# Altium footprint library BaseStation.PcbLib: 68 footprints (part 5 of 5)
Each footprint in its own frame and in the unit in brackets; x right, y up, seen from the top. Pads: shape width x height; smd on the part's side, far side on the other; paste and mask are expansions set on the pad; w line width, h text height; cw(c..) or ccw(c..) is an arc to the next point about the centre after c.
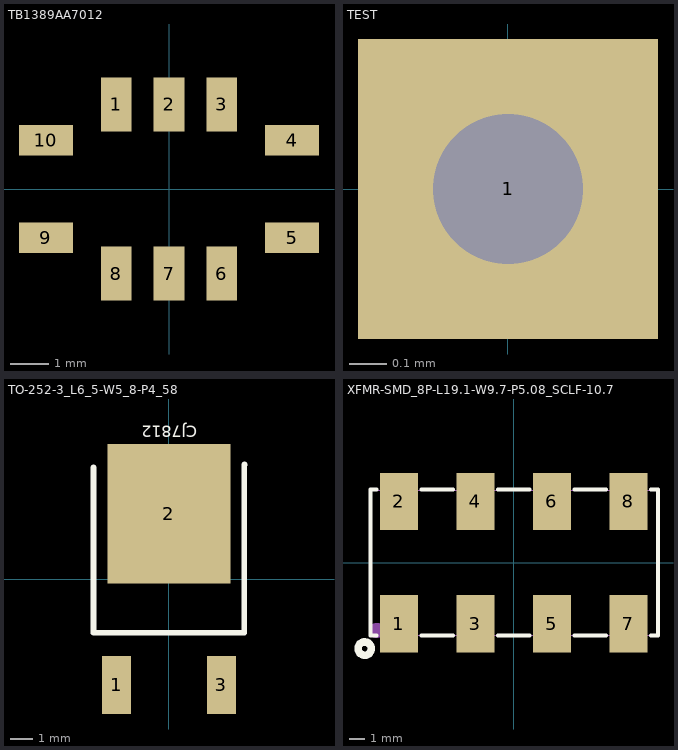
[diagram p4: the footprints below, top view; thin cyan lines are the x and y axes]

## TB1389AA7012 [mm]
pads (10):
  rect 0.8x1.4 smd: 1(-1.37,2.2) 2(0,2.2) 3(1.37,2.2) 6(1.37,-2.2) 7(0,-2.2) 8(-1.37,-2.2)
  rect 1.4x0.8 smd: 4(3.2,1.27) 5(3.2,-1.27) 9(-3.2,-1.27) 10(-3.2,1.27)

## TEST [mm] "TEST"
pads (1):
  rect 0.8x0.8 hole 0.4: 1(0,0)

## TO-252-3_L6_5-W5_8-P4_58 [mm] "TO-252-3_L6_5-W5_8-P4_58"
pads (3):
  rect 1.27x2.54 smd: 1(-2.285,-4.637) 3(2.291,-4.635)
  rect 5.4x6.1 smd: 2(0.001,2.857)
Top Overlay:
  lines w0.254: -3.301,4.759 -3.301,4.886 -3.303,-2.353 3.301,-2.353 3.301,4.886 3.303,5.013
  text "CJ7812" at 1.235,6.72 h0.51

## XFMR-SMD_8P-L19.1-W9.7-P5.08_SCLF-10.7 [mm]
pads (8):
  rect 2.54x3.81 smd: 1(-7.62,-4.065) 2(-7.62,4.065) 3(-2.54,-4.065) 4(-2.54,4.065) 5(2.54,-4.065) 6(2.54,4.065) 7(7.62,-4.065) 8(7.62,4.065)
Top Overlay:
  circle w0.5: c-9.9,-5.7 r0.44
  lines w0.254: -9.121,-4.835 -9.52,-4.835 -9.52,4.865 -9.121,4.865 ; -6.119,-4.835 -4.041,-4.835 ; -6.119,4.865 -4.041,4.865 ; -1.039,-4.835 1.039,-4.835 ; -1.039,4.865 1.039,4.865 ; 4.041,-4.835 6.119,-4.835 ; 4.041,4.865 6.119,4.865 ; 9.121,-4.835 9.58,-4.835 9.58,4.865 9.121,4.865
Mechanical 2:
  circle w0.5: c-9.1,-4.5 r0.25
Mechanical 6:
  lines w0.051: -9.525,-4.825 -9.525,4.825 9.525,4.825 9.525,-4.825 -9.525,-4.825
Mechanical 7:
  region: -8.255,4.065 -8.255,4.835 -6.985,4.835 -6.985,4.065
  region: -3.175,4.065 -3.175,4.835 -1.905,4.835 -1.905,4.065
  region: 1.905,4.065 1.905,4.835 3.175,4.835 3.175,4.065
  region: 6.985,4.065 6.985,4.835 8.255,4.835 8.255,4.065
  region: -6.985,-4.065 -6.985,-4.835 -8.255,-4.835 -8.255,-4.065
  region: -1.905,-4.065 -1.905,-4.835 -3.175,-4.835 -3.175,-4.065
  region: 3.175,-4.065 3.175,-4.835 1.905,-4.835 1.905,-4.065
  region: 8.255,-4.065 8.255,-4.835 6.985,-4.835 6.985,-4.065
Mechanical 8:
  region: -9.465,-5.74 -9.5,-5.775 -9.55,-5.775 -9.585,-5.74 -9.585,-5.69 -9.55,-5.655 -9.5,-5.655 -9.465,-5.69
Mechanical 9:
  region: 7.365,4.825 7.365,5.715 7.875,5.715 7.875,4.825
  region: 7.365,-5.715 7.365,-4.825 7.875,-4.825 7.875,-5.715
  region: 2.285,4.825 2.285,5.715 2.795,5.715 2.795,4.825
  region: 2.285,-5.715 2.285,-4.825 2.795,-4.825 2.795,-5.715
  region: -2.795,4.825 -2.795,5.715 -2.285,5.715 -2.285,4.825
  region: -2.795,-5.715 -2.795,-4.825 -2.285,-4.825 -2.285,-5.715
  region: -7.875,4.825 -7.875,5.715 -7.365,5.715 -7.365,4.825
  region: -7.875,-5.715 -7.875,-4.825 -7.365,-4.825 -7.365,-5.715